# Altium footprint library Connectors.PcbLib: 320 footprints (part 17 of 20)
Each footprint in its own frame and in the unit in brackets; x right, y up, seen from the top. Pads: shape width x height; smd on the part's side, far side on the other; paste and mask are expansions set on the pad; w line width, h text height; cw(c..) or ccw(c..) is an arc to the next point about the centre after c.
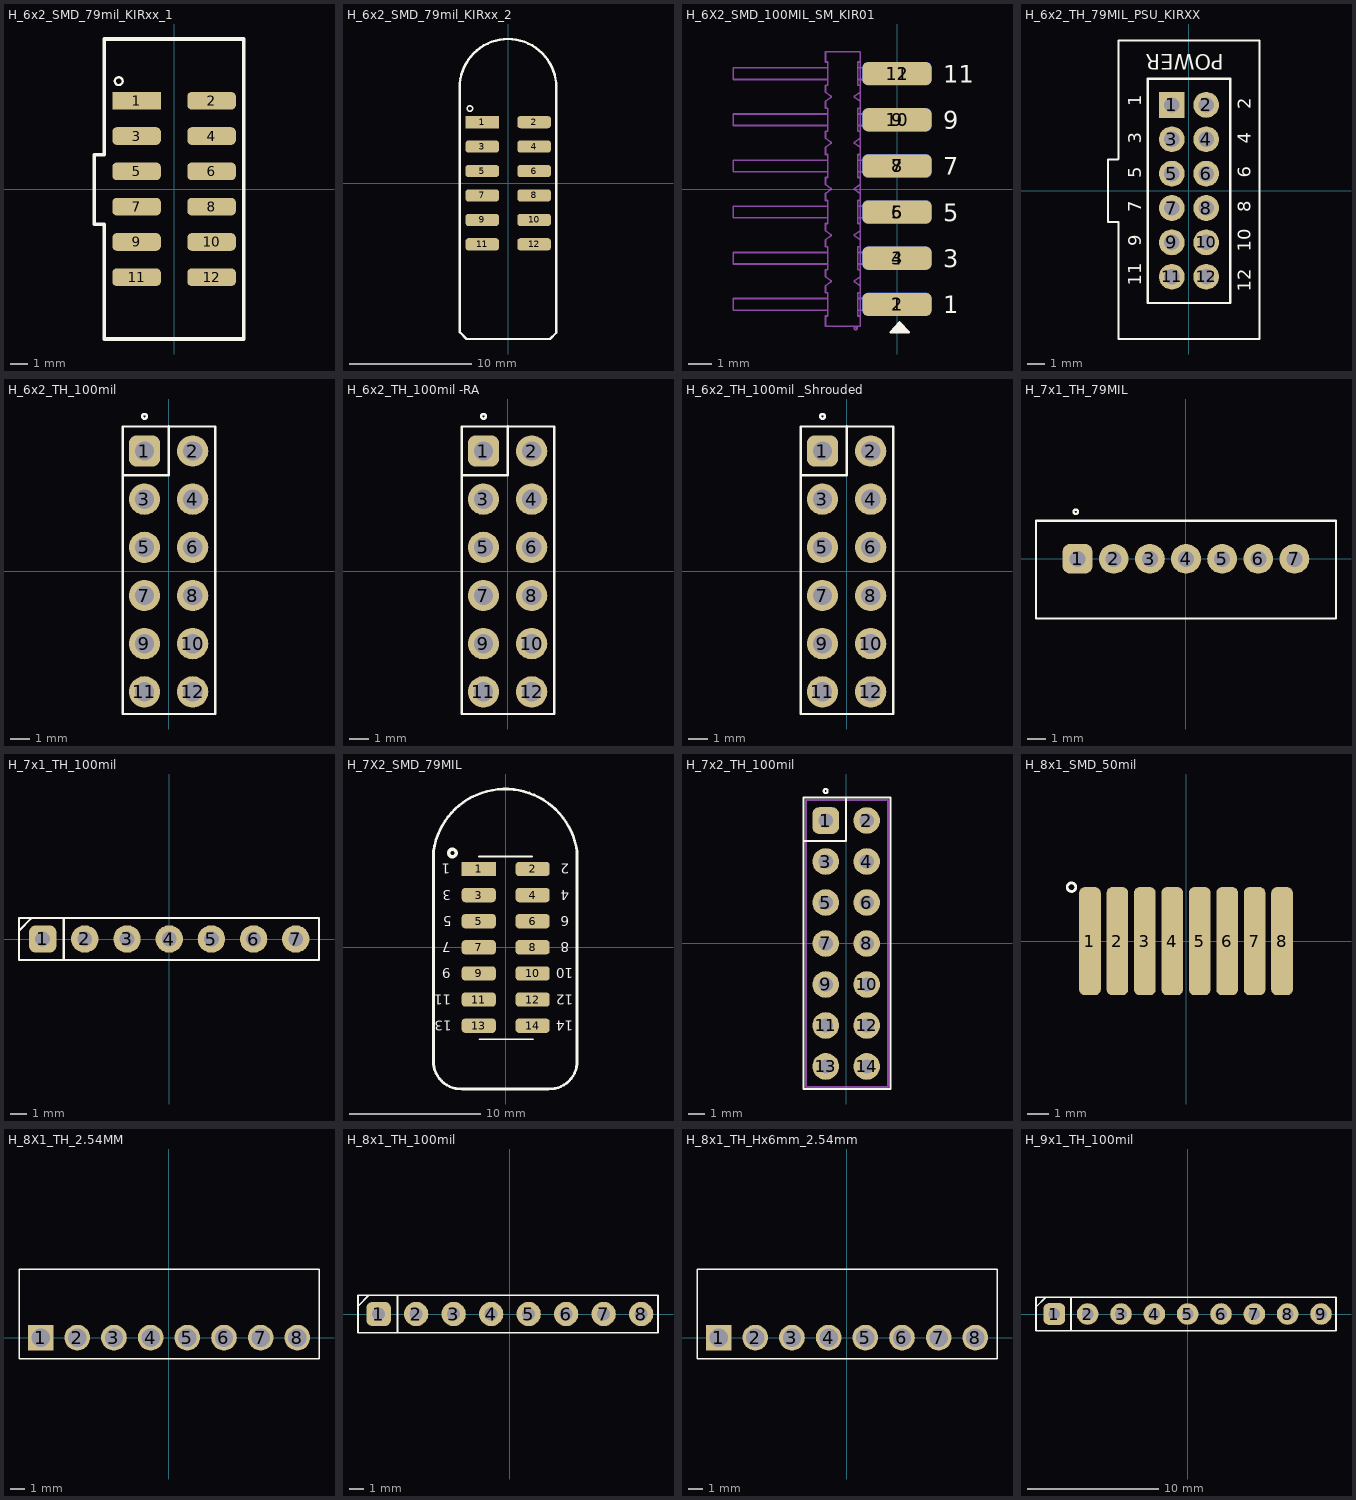
[diagram p16: the footprints below, top view; thin cyan lines are the x and y axes]

## H_6x2_SMD_79mil_KIRxx_1 [mm] "/20200429/V-A.Patino"
pads (12):
  rect 2.75x1 smd: 1(-2.125,5)
  rrect50% 2.75x1 smd: 2(2.125,5) 3(-2.125,3) 4(2.125,3) 5(-2.125,1) 6(2.125,1) 7(-2.125,-1) 8(2.125,-1) 9(-2.125,-3) 10(2.125,-3) 11(-2.125,-5) 12(2.125,-5)
Top Overlay:
  circle w0.127: c-3.134,6.111 r0.222
  lines w0.203: -4.52,-1.998 -4.52,1.939 -3.95,1.939 -3.95,8.5 3.95,8.5 3.95,-8.5 -3.95,-8.5 -3.95,-1.998 -4.52,-1.998
3D body "877591214.stp": height 6.51, standoff 0.01, extent -2.75,-5.95 2.75,5.95

## H_6x2_SMD_79mil_KIRxx_2 [mm] "/20200429/V-A.Patino"
pads (12):
  rect 2.75x1 smd: 1(-2.125,5)
  rrect50% 2.75x1 smd: 2(2.125,5) 3(-2.125,3) 4(2.125,3) 5(-2.125,1) 6(2.125,1) 7(-2.125,-1) 8(2.125,-1) 9(-2.125,-3) 10(2.125,-3) 11(-2.125,-5) 12(2.125,-5)
Top Overlay:
  circle w0.127: c-3.134,6.111 r0.222
  lines w0.203: 3.936,7.858 ccw(c-0.013,7.858) -3.963,7.858 -3.963,-12.19 -3.401,-12.752 3.426,-12.752 3.937,-12.241 3.937,7.858
3D body "877591214.stp": height 6.51, standoff 0.01, extent -2.75,-5.95 2.75,5.95

## H_6X2_SMD_100MIL_SM_KIR01 [mm] "/ C-A.Serna.A / 20190710"
pads (12):
  rrect50% 3x1 smd: 1(0,-5) 3(0,-3) 5(0,-1) 7(0,1) 9(0,3) 11(0,5)
  rrect50% 3x1 smd far side: 2(0,-5) 4(0,-3) 6(0,-1) 8(0,1) 10(0,3) 12(0,5)
Top Overlay:
  region: -0.264,-6.207 0.498,-6.207 0.102,-5.793
  lines w0.127: -0.264,-6.207 0.498,-6.207 0.102,-5.793 -0.264,-6.207
  text "11" at 2,4.613 h0.76
  text "9" at 2,2.613 h0.76
  text "7" at 2,0.613 h0.76
  text "5" at 2,-1.387 h0.76
  text "3" at 2,-3.387 h0.76
  text "1" at 2,-5.387 h0.76
Bottom Overlay:
  text "2" at 2.565,-5.407 h0.76
  text "4" at 2.565,-3.407 h0.76
  text "6" at 2.565,-1.407 h0.76
  text "8" at 2.565,0.593 h0.76
  text "10" at 3.2,2.593 h0.76
  text "12" at 3.2,4.593 h0.76
Mechanical 15:
  drawing of 219 lines, arcs and shapes, not listed
3D body "878301221.stp": height 2, standoff -2, extent -7,-5.95 1.1,5.95

## H_6x2_TH_79MIL_PSU_KIRXX [mm] "20190515 / V-A.Patino"
pads (12):
  rect 1.5x1.5 hole 0.889: 1(-1,5)
  round 1.5 hole 0.889: 2(1,5) 3(-1,3) 4(1,3) 5(-1,1) 6(1,1) 7(-1,-1) 8(1,-1) 9(-1,-3) 10(1,-3) 11(-1,-5) 12(1,-5)
Top Overlay:
  lines w0.127: -4.124,1.825 -4.708,1.825 -4.708,-1.807 -4.099,-1.807 ; -4.106,-1.807 -4.106,-8.623 4.08,-8.623 ; -4.106,1.85 -4.106,6.549 -4.106,8.747 4.105,8.747 4.105,-8.623 ; -2.4,-6.524 -2.4,6.524 ; -2.397,-6.524 2.4,-6.524 2.4,6.524 -0.365,6.524 ; -2.397,6.524 0.905,6.524
  text "9" at -2.778,-3.236 h0.76
  text "7" at -2.778,-1.254 h0.76
  text "5" at -2.778,0.746 h0.76
  text "3" at -2.778,2.746 h0.76
  text "12" at 3.597,-5.871 h0.76
  text "10" at 3.597,-3.533 h0.76
  text "8" at 3.597,-1.254 h0.76
  text "6" at 3.597,0.764 h0.76
  text "4" at 3.597,2.728 h0.76
  text "2" at 3.597,4.746 h0.76
  text "11" at -2.778,-5.516 h0.76
  text "1" at -2.778,4.909 h0.76
  text "POWER" at 2.023,7.946 h0.89
3D body "TMM-106-01-T-D-RA.stp": height 5.04, standoff -3.19, extent -1.902,-5.953 5.083,6.047

## H_6x2_TH_100mil [mil] "/ 20210811 / V-A.Patino"
pads (12):
  rrect50% 65x65 hole 40: 1(-50,250)
  round 65 hole 40: 2(50,250) 3(-50,150) 4(50,150) 5(-50,50) 6(50,50) 7(-50,-50) 8(50,-50) 9(-50,-150) 10(50,-150) 11(-50,-250) 12(50,-250)
Top Overlay:
  circle w5: c-50,322 r4.92
  lines w5: -95.19,200 0,200 0,301.5 ; -95.19,-296 97,-296 97,301 -95.19,301 -95.19,-296
3D body "s10129381-X12002XLF.stp": height 330.43, standoff -89.71, extent -95.19,-298.5 95.11,301.5

## H_6x2_TH_100mil -RA [mil] "/ 20221116 / J.Jaramillo"
pads (12):
  rrect50% 65x65 hole 40: 1(-50,250)
  round 65 hole 40: 2(50,250) 3(-50,150) 4(50,150) 5(-50,50) 6(50,50) 7(-50,-50) 8(50,-50) 9(-50,-150) 10(50,-150) 11(-50,-250) 12(50,-250)
Top Overlay:
  circle w5: c-50,322 r4.92
  lines w5: -95.19,200 0,200 0,301.5 ; -95.19,-296 97,-296 97,301 -95.19,301 -95.19,-296
3D body "s10129382-X12002XLF.stp": height 190.66, standoff -89.66, extent -439.37,-300 62.99,300

## H_6x2_TH_100mil _Shrouded [mil] "/ 20221122 / J.Jaramillo"
pads (12):
  rrect50% 65x65 hole 40: 1(-50,250)
  round 65 hole 40: 2(50,250) 3(-50,150) 4(50,150) 5(-50,50) 6(50,50) 7(-50,-50) 8(50,-50) 9(-50,-150) 10(50,-150) 11(-50,-250) 12(50,-250)
Top Overlay:
  circle w5: c-50,322 r4.92
  lines w5: -95.19,200 0,200 0,301.5 ; -95.19,-296 97,-296 97,301 -95.19,301 -95.19,-296
3D body "connector 12pin.stp": height 362.72, standoff -117.6, extent -60.7,-450.79 472.44,450.79

## H_7x1_TH_79MIL [mil] "/20220804/J-E.Pachon"
pads (7):
  rrect50% 65x65 hole 35: 1(-236.22,0)
  round 65 hole 35: 2(-157.48,0) 3(-78.74,0) 4(0,0) 5(78.74,0) 6(157.48,0) 7(236.22,0)
Top Overlay:
  circle w5: c-240.16,102.36 r4.92
  lines w5: -326.77,-129.92 326.77,-129.92 326.77,82.68 -326.77,82.68 -326.77,-129.92
3D body "62000711622.stp": height 238.19, standoff -135.83, extent -315.51,-116.13 314.41,68.9

## H_7x1_TH_100mil [mil] "/ 20190829 / M-X.Arias"
pads (7):
  rrect50% 65x65 hole 35: 1(-300,0)
  round 65 hole 35: 2(-200,0) 3(-100,0) 4(0,0) 5(100,0) 6(200,0) 7(300,0)
Top Overlay:
  lines w5: -356,19.68 -326.87,48.82 ; -250,-50 -250,50 ; -356,-50 -356,50 355,50 355,-50 -356,-50

## H_7X2_SMD_79MIL [mm] "/20200724/N-A.Potosi"
pads (14):
  rect 2.613x1.1 smd: 1(-2.063,6)
  rrect50% 2.613x1.1 smd: 2(2.063,6) 3(-2.063,4) 4(2.063,4) 5(-2.063,2) 6(2.063,2) 7(-2.063,0) 8(2.063,0) 9(-2.063,-2) 10(2.063,-2) 11(-2.063,-4) 12(2.063,-4) 13(-2.063,-6) 14(2.063,-6)
Top Overlay:
  circle w0.254: c-4.08,7.219 r0.29
  lines w0.127: -2.076,6.952 2.014,6.957 ; -2.003,-7.05 2.087,-7.045
  lines w0.203: -5.524,-8.928 ccw(c-3.425,-8.74) -3.337,-10.845 ; -5.523,-8.95 -5.523,7.4 cw(c-0.039,6.574) 5.457,7.321 ; -3.337,-10.842 3.272,-10.845 ccw(c3.36,-8.74) 5.459,-8.928 ; 5.457,-8.928 5.457,7.4
  text "1" at -4.258,6.381 h0.76
  text "3" at -4.16,4.381 h0.76
  text "2" at 4.856,6.381 h0.76
  text "4" at 4.856,4.381 h0.76
  text "6" at 4.856,2.381 h0.76
  text "8" at 4.856,0.381 h0.76
  text "10" at 5.173,-1.619 h0.76
  text "12" at 5.173,-3.619 h0.76
  text "14" at 5.173,-5.619 h0.76
  text "13" at -4.129,-5.619 h0.76
  text "11" at -4.154,-3.619 h0.76
  text "9" at -4.218,-1.619 h0.76
  text "7" at -4.195,0.381 h0.76
  text "5" at -4.135,2.381 h0.76
3D body "57202g5207lf.stp": height 6.52, standoff 0.02, extent -3.033,-7.045 2.972,6.955

## H_7x2_TH_100mil [mil] "/ 20190614 / J-P.Vargas.A"
pads (14):
  rrect50% 65x65 hole 35: 1(-50,300)
  round 65 hole 35: 2(50,300) 3(-50,200) 4(50,200) 5(-50,100) 6(50,100) 7(-50,0) 8(50,0) 9(-50,-100) 10(50,-100) 11(-50,-200) 12(50,-200) 13(-50,-300) 14(50,-300)
Top Overlay:
  circle w5: c-50,372 r4.92
  lines w5: -104,250 0,250 0,356 ; -104,-355 108,-355 108,356 -104,356 -104,-355
Mechanical 1:
  lines w3.94: -98,-350 102,-350 102,350 -98,350 -98,-350
3D body "m20-9980745_asm.stp": height 340.16, standoff -119.69, extent -98.32,-350 101.68,350

## H_8x1_SMD_50mil [mm] "/ 20190916/ N A potosi"
pads (8):
  rrect50% 1x5 smd: 1(-4.445,0) 2(-3.175,0) 3(-1.905,0) 4(-0.635,0) 5(0.635,0) 6(1.905,0) 7(3.175,0) 8(4.445,0)
Top Overlay:
  circle w0.127: c-5.3,2.5 r0.2

## H_8X1_TH_2.54MM [mil] "/20221011/J-E.Pachon"
pads (8):
  rect 70x70 hole 50: 1(-350,0)
  round 70 hole 50: 2(-250,0) 3(-150,0) 4(-50,0) 5(50,0) 6(150,0) 7(250,0) 8(350,0)
Top Overlay:
  lines w3.94: -408.97,-58.27 409.06,-58.27 409.06,187.01 -408.97,187.01 -408.97,-58.27
3D body "022288083.stp": height 98.5, standoff -134.5, extent -399.63,-9.24 400.37,487.75

## H_8x1_TH_100mil [mil] "/ 20190823 / C-D Viveros"
pads (8):
  rrect50% 65x65 hole 35: 1(-350,0)
  round 65 hole 35: 2(-250,0) 3(-150,0) 4(-50,0) 5(50,0) 6(150,0) 7(250,0) 8(350,0)
Top Overlay:
  lines w5: -405,20.87 -375.87,50 ; -300,-50 -300,50 ; -405,-50 395,-50 395,50 -405,50 -405,-50

## H_8x1_TH_Hx6mm_2.54mm [mil] "/20221128/J-A.Sepulveda"
pads (8):
  rect 70x70 hole 50: 1(-350,0)
  round 70 hole 50: 2(-250,0) 3(-150,0) 4(-50,0) 5(50,0) 6(150,0) 7(250,0) 8(350,0)
Top Overlay:
  lines w3.94: -408.97,-58.27 -408.97,187.01 409.06,187.01 409.06,-58.27 -408.97,-58.27
3D body "61300811021_Downloads_STP_61300811021_rev1.stp": height 100.5, standoff -117.61, extent -399.63,-9.24 400.37,398.63

## H_9x1_TH_100mil [mil] "/ 20190919 / C-D Viveros"
pads (9):
  rrect50% 65x65 hole 35: 1(-400,0)
  round 65 hole 35: 2(-300,0) 3(-200,0) 4(-100,0) 5(0,0) 6(100,0) 7(200,0) 8(300,0) 9(400,0)
Top Overlay:
  lines w5: -455,20.87 -425.87,50 ; -350,-50 -350,50 ; -455,-50 445,-50 445,50 -455,50 -455,-50